# Altium footprint library amirlib.PcbLib: 456 footprints (part 15 of 29)
Each footprint in its own frame and in the unit in brackets; x right, y up, seen from the top. Pads: shape width x height; smd on the part's side, far side on the other; paste and mask are expansions set on the pad; w line width, h text height; cw(c..) or ccw(c..) is an arc to the next point about the centre after c.
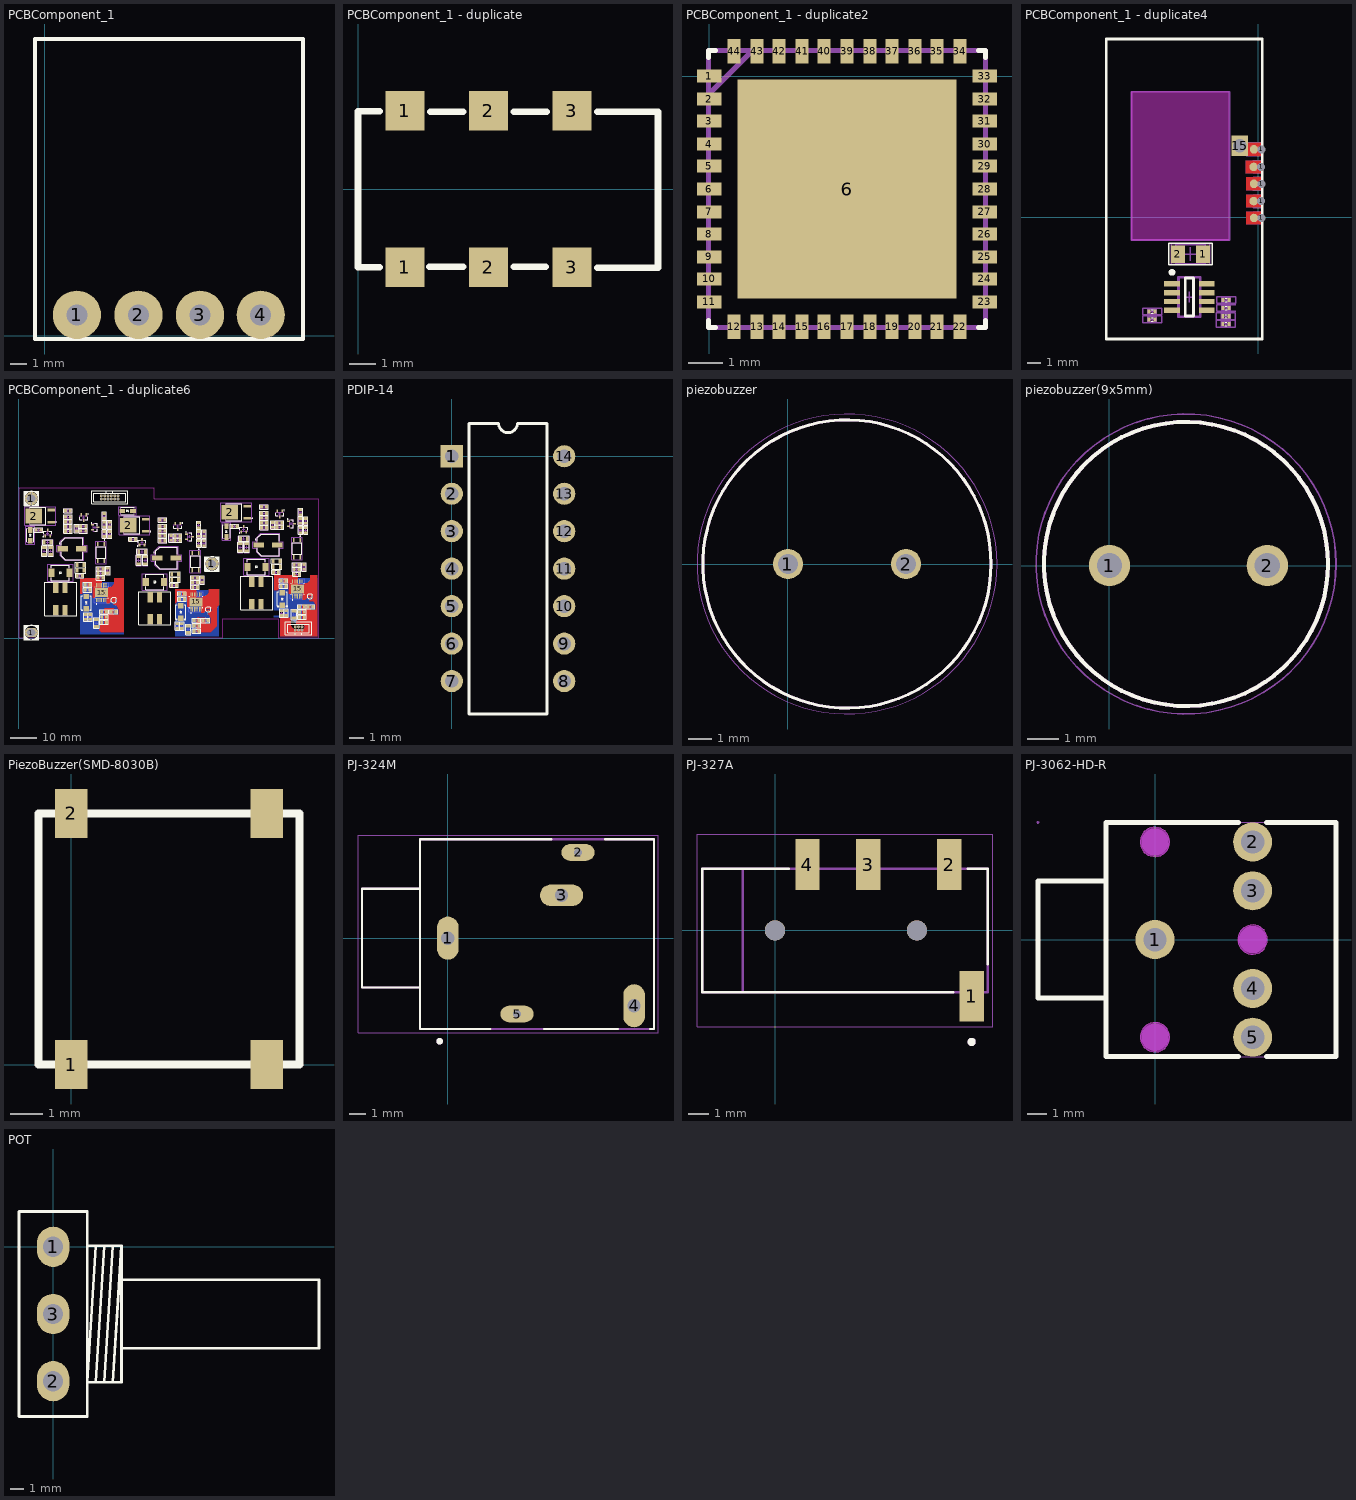
[diagram p14: the footprints below, top view; thin cyan lines are the x and y axes]

## PCBComponent_1 [mm]
pads (4):
  round 3 hole 1.3: 1(2,1.3) 2(5.825,1.3) 3(9.65,1.3) 4(13.425,1.3)
Top Overlay:
  lines w0.254: -0.6,-0.2 -0.6,18.45 16.05,18.45 16.05,-0.2 -0.6,-0.2
3D body "User Library-KEFA 3_81mm_4pin_RA.STEP": height 11.18, standoff -0.1, extent -0.565,0 16.065,18.4

## PCBComponent_1 - duplicate [mm]
pads (6):
  rect 1.5x1.5 smd: 1(1.8,-2.987) 1(1.8,3.013) 2(5,-2.987) 2(5,3.013) 3(8.2,-2.987) 3(8.2,3.013)
Top Overlay:
  lines w0.254: 0.825,-2.987 0,-2.987 0,2.987 0.825,2.987 ; 2.725,-2.975 4.025,-2.975 ; 2.775,2.975 4.025,2.975 ; 5.975,-2.975 7.2,-2.975 ; 5.975,2.975 7.225,2.975 ; 9.175,-3 11.475,-3 ; 9.175,2.975 11.5,2.975 11.5,-3

## PCBComponent_1 - duplicate1 [mm]
Keep-Out Layer:
  drawing of 191 lines, arcs and shapes, not listed

## PCBComponent_1 - duplicate2 [mil]
pads (45):
  rect 28x15 smd: 1(0,0) 2(0,-26) 3(0,-51) 4(0,-77) 5(0,-102) 6(0,-128) 7(0,-154) 8(0,-179) 9(0,-205) 10(0,-230) 11(0,-256) 23(312,-256) 24(312,-230) 25(312,-205) 26(312,-179) 27(312,-154) 28(312,-128) 29(312,-102) 30(312,-77) 31(312,-51) 32(312,-26) 33(312,0)
  rect 248x248 smd: 6(156,-128)
  rect 15x28 smd: 12(28,-284) 13(54,-284) 14(79,-284) 15(105,-284) 16(130,-284) 17(156,-284) 18(182,-284) 19(207,-284) 20(233,-284) 21(258,-284) 22(284,-284) 34(284,28) 35(258,28) 36(233,28) 37(207,28) 38(182,28) 39(156,28) 40(130,28) 41(105,28) 42(79,28) 43(54,28) 44(28,28)
Top Overlay:
  lines w6: -1,-277 -1,-285 7,-285 ; -1,21 -1,29 7,29 ; 305,-285 313,-285 313,-277 ; 305,29 313,29 313,21
Mechanical 13:
  lines w6: -1,-285 -1,29 ; -1,-285 313,-285 ; -1,-285 -1,29 ; -1,-285 313,-285 ; -1,29 313,29 ; -1,29 313,29 ; 313,-285 313,29 ; 313,-285 313,29 ; -1,-263 -1,-248 -1,-263 ; -1,-238 -1,-223 -1,-238 ; -1,-212 -1,-197 -1,-212 ; -1,-187 -1,-172 -1,-187 ; -1,-161 -1,-146 -1,-161 ; -1,-135 -1,-121 -1,-135 ; -1,-110 -1,-95 -1,-110 ; -1,-84 -1,-69 -1,-84 ; -1,-59 -1,-44 -1,-59 ; -1,-33 -1,-18 -1,-33 ; -1,-21 49,29 -1,-21 ; -1,-8 -1,7 -1,-8 ; 21,-285 36,-285 21,-285 ; 21,29 36,29 21,29 ; 46,-285 61,-285 46,-285 ; 46,29 61,29 46,29 ; 72,-285 87,-285 72,-285 ; 72,29 87,29 72,29 ; 97,-285 112,-285 97,-285 ; 97,29 112,29 97,29 ; 123,-285 138,-285 123,-285 ; 123,29 138,29 123,29 ; 149,-285 163,-285 149,-285 ; 149,29 163,29 149,29 ; 174,-285 189,-285 174,-285 ; 174,29 189,29 174,29 ; 200,-285 215,-285 200,-285 ; 200,29 215,29 200,29 ; 225,-285 240,-285 225,-285 ; 225,29 240,29 225,29 ; 251,-285 266,-285 251,-285 ; 251,29 266,29 251,29 ; 276,-285 291,-285 276,-285 ; 276,29 291,29 276,29 ; 313,-263 313,-248 313,-263 ; 313,-238 313,-223 313,-238 ; 313,-212 313,-197 313,-212 ; 313,-187 313,-172 313,-187 ; 313,-161 313,-146 313,-161 ; 313,-135 313,-121 313,-135 ; 313,-110 313,-95 313,-110 ; 313,-84 313,-69 313,-84 ; 313,-59 313,-44 313,-59 ; 313,-33 313,-18 313,-33 ; 313,-8 313,7 313,-8
3D body "ENC424J600-I_ML--3DModel-STEP-510211.STEP": height 39.37, standoff 0, extent -1.48,-285.48 313.48,29.48

## PCBComponent_1 - duplicate3 [mm]

## PCBComponent_1 - duplicate4 [mm]
pads (28):
  rect 0.2x0.3 smd: 1(-8.026,-6.934) 1(-7.58,-7.518) 1(-2.591,-7.29) 1(-2.577,-6.096) 1(-2.145,-7.849) 1(-2.131,-6.68) 2(-8.026,-7.518) 2(-7.58,-6.934) 2(-2.591,-7.849) 2(-2.577,-6.68) 2(-2.145,-7.29) 2(-2.131,-6.096)
  rect 1.15x0.4 smd: 1(-6.335,-4.902) 2(-6.335,-5.552) 3(-6.335,-6.202) 4(-6.335,-6.852) 5(-3.785,-6.852) 6(-3.785,-6.202) 7(-3.785,-5.552) 8(-3.785,-4.902)
  rect 1.05x1.3 smd: 1(-4.049,-2.711) 2(-5.899,-2.711)
  round 0.625 hole 0.6 copper offset -0.55,0 mask-2539.97: 1(0.224,3.708) 1(0.228,1.193) 1(0.254,-0.051) 1(0.254,2.464) 1(0.254,5.004)
  rect 1.2x1.5 / inner rect 1.2x1.5 / far side rect 1x1.5 hole 1: 15(-1.346,5.258)
via -1192.174,-1183.767 diameter 0 hole 0.854
via -1192.174,-1183.767 diameter 0 hole 0.854
via -1192.205,-1185.063 diameter 0 hole 0.854
via -1192.205,-1185.063 diameter 0 hole 0.854
via -1192.174,-1186.307 diameter 0 hole 0.854
via -1192.174,-1186.307 diameter 0 hole 0.854
via -1192.2,-1187.578 diameter 0 hole 0.854
via -1192.2,-1187.578 diameter 0 hole 0.854
via -1192.174,-1188.822 diameter 0 hole 0.854
via -1192.174,-1188.822 diameter 0 hole 0.854
Top Layer:
  region: -0.855,4.534 0.237,4.534 0.263,4.559 0.263,5.474 -0.855,5.474
  region: -0.885,3.238 0.207,3.238 0.232,3.263 0.232,4.178 -0.885,4.178
  region: -0.855,1.994 0.237,1.994 0.263,2.019 0.263,2.934 -0.855,2.934
  region: -0.881,0.723 0.211,0.723 0.237,0.749 0.237,1.663 -0.881,1.663
  region: -0.855,-0.521 0.237,-0.521 0.263,-0.495 0.263,0.419 -0.855,0.419
  lines w0.254: -6.71,-4.902 -6.335,-4.902
Bottom Layer:
  region: -0.855,4.534 0.237,4.534 0.263,4.559 0.263,5.474 -0.855,5.474
  region: -0.885,3.238 0.207,3.238 0.232,3.263 0.232,4.178 -0.885,4.178
  region: -0.855,1.994 0.237,1.994 0.263,2.019 0.263,2.934 -0.855,2.934
  region: -0.881,0.723 0.211,0.723 0.237,0.749 0.237,1.663 -0.881,1.663
  region: -0.855,-0.521 0.237,-0.521 0.263,-0.495 0.263,0.419 -0.855,0.419
Top Overlay:
  circle w0.25: c-6.335,-4.052 r0.125
  lines w0.051: -7.88,-7.645 -7.727,-7.645 ; -7.88,-7.391 -7.727,-7.391 ; -7.88,-7.061 -7.727,-7.061 ; -7.88,-6.807 -7.727,-6.807 ; -2.444,-7.976 -2.292,-7.976 ; -2.444,-7.722 -2.292,-7.722 ; -2.444,-7.417 -2.292,-7.417 ; -2.444,-7.163 -2.292,-7.163 ; -2.43,-6.807 -2.277,-6.807 ; -2.43,-6.553 -2.277,-6.553 ; -2.43,-6.223 -2.277,-6.223 ; -2.43,-5.969 -2.277,-5.969
  lines w0.1: -6.574,-3.498 -6.574,-1.923 -3.373,-1.923 -3.373,-3.498 -6.574,-3.498
  lines w0.2: -11.176,-8.966 0.305,-8.966 0.305,13.132 -11.176,13.132 -11.176,-8.966 ; -5.36,-7.274 -4.76,-7.274 -4.76,-4.48 -5.36,-4.48 -5.36,-7.274
Top Solder:
  region: -0.857,4.509 -0.857,5.499 0.266,5.499 0.266,4.509
  region: -0.888,3.213 -0.888,4.203 0.235,4.203 0.235,3.213
  region: -0.857,1.969 -0.857,2.959 0.266,2.959 0.266,1.969
  region: -0.883,0.698 -0.883,1.688 0.24,1.688 0.24,0.698
  region: -0.857,-0.546 -0.857,0.444 0.266,0.444 0.266,-0.546
Bottom Solder:
  region: -0.855,4.534 0.237,4.534 0.263,4.559 0.263,5.474 -0.855,5.474
  region: -0.885,3.238 0.207,3.238 0.232,3.263 0.232,4.178 -0.885,4.178
  region: -0.855,1.994 0.237,1.994 0.263,2.019 0.263,2.934 -0.855,2.934
  region: -0.881,0.723 0.211,0.723 0.237,0.749 0.237,1.663 -0.881,1.663
  region: -0.855,-0.521 0.237,-0.521 0.263,-0.495 0.263,0.419 -0.855,0.419
Keep-Out Layer:
  board cut-out: -9.347,-1.676 -2.159,-1.676 -2.159,9.246 -9.347,9.246
Mechanical 6:
  lines w0.127: -0.356,0.356 0.254,0.356 ; -0.356,1.626 0.254,1.626 ; -0.356,1.981 0.254,1.981 ; -0.356,2.946 0.254,2.946 ; -0.356,4.166 0.229,4.166 ; -0.33,0.711 0.254,0.711 ; -0.33,3.277 0.229,3.277 ; 0.229,4.547 -0.33,4.547 -0.864,4.547 -0.864,5.486 -0.33,5.486 0.254,5.486 0.254,4.572 ; -2.108,-1.676 -9.322,-1.676 -9.322,9.246 -2.108,9.246 ; -2.108,-1.676 -2.108,9.246 ; -2.108,-1.676 -2.108,9.246
Mechanical 13:
  lines w0.1: -8.128,-7.693 -7.478,-7.693 -7.478,-7.343 -8.128,-7.343 -8.128,-7.693 ; -8.128,-7.109 -7.478,-7.109 -7.478,-6.759 -8.128,-6.759 -8.128,-7.109 ; -6.049,-3.411 -6.049,-2.011 -3.899,-2.011 -3.899,-3.411 -6.049,-3.411 ; -2.693,-8.024 -2.043,-8.024 -2.043,-7.674 -2.693,-7.674 -2.693,-8.024 ; -2.693,-7.465 -2.043,-7.465 -2.043,-7.115 -2.693,-7.115 -2.693,-7.465 ; -2.679,-6.855 -2.029,-6.855 -2.029,-6.505 -2.679,-6.505 -2.679,-6.855 ; -2.679,-6.271 -2.029,-6.271 -2.029,-5.921 -2.679,-5.921 -2.679,-6.271
  lines w0.2: -5.86,-7.327 -4.26,-7.327 -4.26,-4.427 -5.86,-4.427 -5.86,-7.327
Mechanical 15:
  lines w0.1: -7.978,-7.518 -7.628,-7.518 ; -7.978,-6.934 -7.628,-6.934 ; -7.803,-7.693 -7.803,-7.343 ; -7.803,-7.109 -7.803,-6.759 ; -5.474,-2.711 -4.474,-2.711 ; -5.441,-5.877 -4.679,-5.877 ; -5.06,-6.258 -5.06,-5.496 ; -4.974,-3.211 -4.974,-2.211 ; -2.543,-7.849 -2.193,-7.849 ; -2.543,-7.29 -2.193,-7.29 ; -2.529,-6.68 -2.179,-6.68 ; -2.529,-6.096 -2.179,-6.096 ; -2.368,-8.024 -2.368,-7.674 ; -2.368,-7.465 -2.368,-7.115 ; -2.354,-6.855 -2.354,-6.505 ; -2.354,-6.271 -2.354,-5.921 ; -1.654,-6.93 -3.054,-6.93 -3.054,-6.43 -1.654,-6.43 ; -8.503,-7.768 -8.503,-7.268 -7.103,-7.268 -7.103,-7.768 -8.503,-7.768 ; -8.503,-7.184 -8.503,-6.684 -7.103,-6.684 -7.103,-7.184 -8.503,-7.184 ; -6.399,-3.461 -6.399,-1.961 -3.549,-1.961 -3.549,-3.461 -6.399,-3.461 ; -3.068,-8.099 -3.068,-7.599 -1.668,-7.599 -1.668,-8.099 -3.068,-8.099 ; -3.068,-7.54 -3.068,-7.04 -1.668,-7.04 -1.668,-7.54 -3.068,-7.54 ; -3.054,-6.346 -3.054,-5.846 -1.654,-5.846 -1.654,-6.346 -3.054,-6.346
3D body "0201.STEP": height 0.25, standoff 0, extent -2.608,-6.807 -2.1,-6.553
3D body "0201.STEP": height 0.25, standoff 0, extent -2.608,-6.223 -2.1,-5.969
3D body "0201.STEP": height 0.25, standoff 0, extent -2.622,-7.976 -2.114,-7.722
3D body "0201.STEP": height 0.25, standoff 0, extent -2.622,-7.417 -2.114,-7.163
3D body "0201.STEP": height 0.25, standoff 0, extent -8.057,-7.061 -7.549,-6.807
3D body "0201.STEP": height 0.25, standoff 0, extent -8.057,-7.645 -7.549,-7.391
3D body "cap 0805.STEP": height 0.65, standoff 0, extent -6.015,-3.321 -3.983,-2.051
3D body "User Library-SOT-23-8 Thin.STEP": height 1.1, standoff 0, extent -6.544,-7.317 -3.586,-4.417

## PCBComponent_1 - duplicate5 [mm]

## PCBComponent_1 - duplicate6 [mm]
pads (394):
  rect 1.57x2.22 smd: 1(4.318,41.24) 1(79.026,42.68) 2(4.318,37.16) 2(79.026,38.6)
  oval 5x3.5 hole 3.15 mask+0.1: 1(4.736,2.152)
  round 5 hole 3.15 mask+0.1: 1(4.736,53.231) 1(73.557,28.325)
  rect 1.05x1.3 smd: 1(6.568,41.224) 1(17.744,44.357) 1(17.744,48.59) 1(19.594,40.716) 1(19.594,42.537) 1(19.594,46.177) 1(22.245,23.766) 1(25.237,20.432) 1(25.436,40.843) 1(25.436,42.621) 1(27.087,18.4) 1(30.226,22.972) 1(31.536,6.056) 1(31.536,8.088) 1(31.536,10.12) 1(32.04,24.75) 1(32.04,26.528) 1(36.942,10.12) 1(42.541,37.711) 1(53.717,40.844) 1(53.717,45.077) 1(55.567,37.203) 1(55.567,39.023) 1(55.567,42.664) 1(58.218,20.253) 1(61.21,16.919) 1(61.409,37.33) 1(61.409,39.108) 1(63.06,14.887) 1(66.199,19.459) 1(66.671,2.695) 1(66.671,4.727) 1(66.671,6.759) 1(68.013,21.237) 1(68.013,23.015) 1(72.077,6.759) 1(81.276,42.664) 1(92.452,45.797) 1(92.452,50.03) 1(94.302,42.156) 1(94.302,43.976) 1(94.302,47.617) 1(96.953,25.206) 1(99.945,21.872) 1(100.144,42.283) 1(100.144,44.061) 1(101.795,19.84) 1(104.934,24.412) 1(106.748,26.19) 1(106.748,27.968) 1(106.854,7.978) 1(106.854,10.01) 1(106.854,12.042) 1(111.999,12.04) 2(8.418,41.224) 2(17.744,40.716) 2(17.744,42.537) 2(17.744,46.177) 2(19.594,44.357) 2(19.594,48.59) 2(23.586,40.843) 2(23.586,42.621) 2(24.095,23.766) 2(25.237,18.4) 2(27.087,20.432) 2(30.19,24.75) 2(30.19,26.528) 2(32.076,22.972) 2(33.386,6.056) 2(33.386,8.088) 2(33.386,10.12) 2(35.092,10.12) 2(44.391,37.711) 2(53.717,37.203) 2(53.717,39.023) 2(53.717,42.664) 2(55.567,40.844) 2(55.567,45.077) 2(59.559,37.33) 2(59.559,39.108) 2(60.068,20.253) 2(61.21,14.887) 2(63.06,16.919) 2(66.163,21.237) 2(66.163,23.015) 2(68.049,19.459) 2(68.521,2.695) 2(68.521,4.727) 2(68.521,6.759) 2(70.227,6.759) 2(83.126,42.664) 2(92.452,42.156) 2(92.452,43.976) 2(92.452,47.617) 2(94.302,45.797) 2(94.302,50.03) 2(98.294,42.283) 2(98.294,44.061) 2(98.803,25.206) 2(99.945,19.84) 2(101.795,21.872) 2(104.898,26.19) 2(104.898,27.968) 2(106.784,24.412) 2(108.704,7.978) 2(108.704,10.01) 2(108.704,12.042) 2(110.149,12.04)
  rect 1.05x1.7 smd: 1(9.67,36.533) 1(22.204,27.932) 1(22.232,25.819) 1(45.643,33.02) 1(58.178,24.419) 1(58.206,22.306) 1(84.378,37.973) 1(96.913,29.372) 1(96.941,27.259) 2(12.266,36.533) 2(24.8,27.932) 2(24.828,25.819) 2(48.239,33.02) 2(60.774,24.419) 2(60.802,22.306) 2(86.974,37.973) 2(99.509,29.372) 2(99.537,27.259)
  rect 1.7x1.05 smd: 1(9.698,34.529) 1(12.111,31.933) 1(45.671,31.016) 1(48.084,28.42) 1(84.406,35.969) 1(86.819,33.373) 2(9.698,31.933) 2(12.111,34.529) 2(45.671,28.42) 2(48.084,31.016) 2(84.406,33.373) 2(86.819,35.969)
  rect 0.6x1.15 smd: 1(9.972,38.956) 1(25.588,47.048) 1(45.945,35.443) 1(61.504,43.67) 1(84.68,40.396) 1(100.296,48.488) 2(11.872,38.956) 2(23.688,47.048) 2(47.845,35.443) 2(59.604,43.67) 2(86.58,40.396) 2(98.396,48.488) 3(10.922,41.206) 3(24.638,44.798) 3(46.895,37.693) 3(60.554,41.42) 3(85.63,42.646) 3(99.346,46.238)
  rect 2.81x0.98 smd: 1(12.293,44.264) 1(48.266,40.751) 1(87.001,45.704) 3(12.293,48.844) 3(48.266,45.331) 3(87.001,50.284)
  rect 2.29x3.12 smd: 1(12.344,24.943) 1(48.318,21.43) 1(87.046,27.178) 2(19.204,24.943) 2(55.178,21.43) 2(93.906,27.178)
  rect 2x4 smd: 1(14.044,10.693) 1(50.017,7.18) 1(88.725,13.022) 2(17.544,10.693) 2(53.517,7.18) 2(92.225,13.022) 3(17.544,19.193) 3(53.517,15.68) 3(92.225,21.522) 4(14.044,19.193) 4(50.017,15.68) 4(88.725,21.522)
  rect 4x2 smd: 1(16.683,34.12) 1(52.656,30.607) 1(91.391,35.56) 2(23.783,34.12) 2(59.756,30.607) 2(98.491,35.56)
  rect 1.3x1.05 smd: 1(21.971,40.807) 1(25.4,7.188) 1(27.178,7.188) 1(32.533,42.331) 1(32.558,40.633) 1(32.558,45.633) 1(33.909,26.655) 1(34.544,42.331) 1(34.544,40.633) 1(57.944,37.294) 1(60.306,3.675) 1(62.084,3.675) 1(68.506,38.818) 1(68.531,37.12) 1(68.531,42.12) 1(69.882,23.142) 1(70.517,38.818) 1(70.517,37.12) 1(96.679,42.247) 1(100.108,8.628) 1(101.886,8.628) 1(107.241,43.771) 1(107.266,42.073) 1(107.266,47.073) 1(108.617,28.095) 1(109.252,43.771) 1(109.252,42.073) 2(21.971,42.657) 2(25.4,9.038) 2(27.178,9.038) 2(32.533,44.181) 2(32.558,38.783) 2(32.558,47.483) 2(33.909,24.805) 2(34.544,44.181) 2(34.544,38.783) 2(57.944,39.144) 2(60.306,5.525) 2(62.084,5.525) 2(68.506,40.668) 2(68.531,35.27) 2(68.531,43.97) 2(69.882,21.292) 2(70.517,40.668) 2(70.517,35.27) 2(96.679,44.097) 2(100.108,10.478) 2(101.886,10.478) 2(107.241,45.621) 2(107.266,40.223) 2(107.266,48.923) 2(108.617,26.245) 2(109.252,45.621) 2(109.252,40.223)
  rect 2.192x2.047 smd paste+0 mask+0.051: 1(25.654,15.883) 1(61.627,12.37) 1(100.362,17.323) 2(25.654,11.161) 2(61.627,7.648) 2(100.362,12.601)
  rect 1.15x0.6 smd: 1(27.958,43.19) 1(63.931,39.677) 1(102.666,44.63) 2(27.958,41.29) 2(63.931,37.777) 2(102.666,42.73) 3(30.208,42.24) 3(66.181,38.727) 3(104.916,43.68)
  rect 1.82x1.16 smd: 1(29.515,4.496) 1(64.516,2.083) 1(104.8,7.742) 2(29.515,7.092) 2(64.516,4.679) 2(104.8,10.338)
  rect 0.3x1.6 smd paste-0.025: 1(29.546,14.572) 1(65.519,11.059) 1(104.254,16.012) 2(30.196,14.572) 2(66.169,11.059) 2(104.904,16.012) 3(30.846,14.572) 3(66.819,11.059) 3(105.554,16.012) 4(31.496,14.572) 4(67.469,11.059) 4(106.204,16.012) 5(32.146,14.572) 5(68.119,11.059) 5(106.854,16.012) 6(32.796,14.572) 6(68.769,11.059) 6(107.504,16.012) 7(33.446,14.572) 7(69.419,11.059) 7(108.154,16.012) 8(33.446,20.172) 8(69.419,16.659) 8(108.154,21.612) 9(32.796,20.172) 9(68.769,16.659) 9(107.504,21.612) 10(32.146,20.172) 10(68.119,16.659) 10(106.854,21.612) 11(31.496,20.172) 11(67.469,16.659) 11(106.204,21.612) 12(30.846,20.172) 12(66.819,16.659) 12(105.554,21.612) 13(30.196,20.172) 13(66.169,16.659) 13(104.904,21.612) 14(29.546,20.172) 14(65.519,16.659) 14(104.254,21.612)
  round 1.1 hole 0.7: 1(31.394,54.305) 1(107.798,3.099) 2(31.394,53.035) 2(107.798,4.369) 3(32.664,54.305) 3(106.528,3.099) 4(32.664,53.035) 4(106.528,4.369) 5(33.934,54.305) 5(105.258,3.099) 6(33.934,53.035) 6(105.258,4.369) 7(35.204,54.305) 8(35.204,53.035) 9(36.474,54.305) 10(36.474,53.035) 11(37.744,54.305) 12(37.744,53.035)
  rrect25% 0.57x1.61 smd: 1(32.512,35.949) 1(68.485,32.436) 1(107.22,37.389) 2(32.512,29.449) 2(68.485,25.936) 2(107.22,30.889) 3(29.972,35.949) 3(65.945,32.436) 3(104.68,37.389) 4(29.972,29.449) 4(65.945,25.936) 4(104.68,30.889)
  round 0.025 smd: 1(36.182,15.022) 1(72.155,11.509) 1(110.89,16.462) 2(36.195,14.082) 2(72.168,10.569) 2(110.903,15.522)
  rect 2.22x1.57 smd: 1(43.419,48.529) 2(39.338,48.529)
  rect 6.33x5.67 smd: 2(5.673,46.554) 2(41.646,43.041) 2(80.381,47.994)
  round 0.43 hole 0.33 mask+0: 15(29.996,16.622) 15(29.996,18.122) 15(31.496,16.622) 15(31.496,18.122) 15(32.996,16.622) 15(32.996,18.122) 15(65.969,13.109) 15(65.969,14.609) 15(67.469,13.109) 15(67.469,14.609) 15(68.969,13.109) 15(68.969,14.609) 15(104.704,18.062) 15(104.704,19.562) 15(106.204,18.062) 15(106.204,19.562) 15(107.704,18.062) 15(107.704,19.562)
  rect 5x3.4 smd paste-3 mask+0: 15(31.496,17.372) 15(67.469,13.859) 15(106.204,18.812)
  round 0.6 hole 0.4: S(2.736,2.152) S(2.736,53.231) S(3.322,0.738) S(3.322,3.566) S(3.322,51.817) S(3.322,54.645) S(4.736,51.231) S(4.736,55.231) S(6.15,0.738) S(6.15,3.566) S(6.15,51.817) S(6.15,54.645) S(6.736,2.152) S(6.736,53.231) S(71.557,28.325) S(72.143,26.911) S(72.143,29.74) S(73.557,26.325) S(73.557,30.325) S(74.971,26.911) S(74.971,29.74) S(75.557,28.325)
Top Layer:
  region: 40.005,2.304 31.354,2.304 30.523,3.134 30.523,3.416 30.925,3.416 30.925,4.906 32.561,4.906 32.561,6.938 32.561,8.97 32.561,11.27 32.563,11.308 32.686,11.41 32.69,11.409 36.287,11.409 36.287,11.27 35.917,11.27 35.917,8.97 37.967,8.97 37.967,11.27 37.598,11.27 37.598,11.724 37.575,11.894 37.51,12.052 37.406,12.188 37.065,12.529 36.929,12.633 36.771,12.698 36.601,12.721 35.927,12.721 35.878,12.838 36.244,13.204 36.576,13.204 36.771,13.243 36.936,13.353 37.317,13.734 37.428,13.9 37.467,14.095 37.467,14.45 37.428,14.646 37.317,14.811 37.152,14.921 36.957,14.96 35.433,14.96 35.238,14.921 35.073,14.811 34.962,14.646 34.923,14.45 34.923,14.069 34.962,13.874 35.001,13.816 34.465,13.279 33.452,13.279 33.452,14.572 33.446,14.615 33.446,15.872 31.89,15.872 31.869,15.886 31.674,15.925 30.709,15.925 30.514,15.886 30.493,15.872 30.376,15.872 30.353,15.877 29.388,15.877 29.365,15.872 28.896,15.872 28.896,15.457 28.891,15.434 28.096,15.434 28.096,17.25 28.112,17.25 28.112,19.55 26.262,19.55 26.262,21.582 24.212,21.582 24.212,19.282 24.212,17.406 24.058,17.406 24.058,16.891 23.368,16.891 23.368,22.616 25.12,22.616 25.12,22.784 31.051,22.784 31.051,21.822 31.49,21.822 31.49,20.172 31.496,20.13 31.496,18.872 32.669,18.872 32.796,18.872 34.096,18.872 34.096,19.517 34.828,19.517 34.998,19.539 35.156,19.604 35.292,19.709 36.1,20.517 36.204,20.653 36.269,20.811 36.292,20.98 36.292,22.784 40.005,22.784
  region: 76.251,12.544 76.225,12.524 75.639,11.938 75.479,11.73 75.378,11.486 75.344,11.225 75.344,4.507 73.141,2.304 67.696,2.304 67.696,3.577 67.696,5.609 67.696,6.718 67.705,6.784 67.705,7.528 67.802,7.625 67.883,7.731 67.975,7.793 68.086,7.958 68.096,8.012 68.125,8.033 68.236,8.06 68.335,7.984 68.493,7.919 68.663,7.896 71.052,7.896 71.052,5.609 73.102,5.609 73.102,7.909 72.733,7.909 72.733,8.376 72.71,8.546 72.645,8.704 72.541,8.84 72.365,9.015 72.229,9.12 72.071,9.185 71.912,9.206 71.883,9.248 71.851,9.325 72.217,9.691 72.549,9.691 72.744,9.73 72.91,9.84 73.291,10.221 73.401,10.387 73.44,10.582 73.44,10.937 73.401,11.132 73.291,11.298 73.125,11.408 72.93,11.447 71.406,11.447 71.211,11.408 71.046,11.298 70.935,11.132 70.896,10.937 70.896,10.556 70.935,10.361 70.974,10.302 70.438,9.766 69.425,9.766 69.425,11.059 69.419,11.102 69.419,12.359 67.665,12.359 67.615,12.369 66.65,12.369 66.599,12.359 66.349,12.359 66.326,12.364 65.361,12.364 65.338,12.359 64.869,12.359 64.869,11.944 64.865,11.921 64.069,11.921 64.069,13.737 64.085,13.737 64.085,16.037 62.235,16.037 62.235,18.069 60.185,18.069 60.185,15.769 60.185,13.893 60.031,13.893 60.031,13.378 59.614,13.378 59.614,18.618 67.024,18.618 67.024,18.309 67.464,18.309 67.464,16.659 67.469,16.616 67.469,15.359 68.642,15.359 68.769,15.359 70.069,15.359 70.069,16.003 70.801,16.003 70.971,16.026 71.129,16.091 71.265,16.195 72.073,17.004 72.177,17.139 72.243,17.298 72.265,17.467 72.265,18.618 76.251,18.618
  region: 113.739,0.764 99.621,0.764 99.621,7.341 99.594,7.476 99.692,7.603 103.036,7.603 103.036,7.677 103.047,7.679 103.263,7.769 103.39,7.714 103.39,6.662 103.614,6.662 103.614,5.005 103.648,4.744 103.749,4.5 103.909,4.291 104.336,3.864 104.417,3.724 104.613,3.529 104.852,3.39 105.119,3.319 105.396,3.319 105.55,3.36 106.235,3.36 106.389,3.319 106.666,3.319 106.82,3.36 107.505,3.36 107.659,3.319 107.936,3.319 108.203,3.39 108.442,3.529 108.638,3.724 108.776,3.964 108.848,4.231 108.848,4.507 108.776,4.774 108.638,5.014 108.442,5.209 108.203,5.347 107.936,5.419 107.659,5.419 107.505,5.377 106.82,5.377 106.666,5.419 106.389,5.419 106.235,5.377 105.676,5.377 105.631,5.422 105.631,6.662 106.21,6.662 106.21,6.828 107.879,6.828 107.879,8.86 107.879,10.892 107.879,12.849 110.974,12.849 110.974,10.89 113.024,10.89 113.024,13.19 112.644,13.19 112.644,13.329 112.622,13.499 112.556,13.657 112.452,13.793 112.276,13.968 112.141,14.073 111.983,14.138 111.813,14.16 110.635,14.16 110.586,14.278 110.952,14.644 111.284,14.644 111.479,14.683 111.645,14.793 112.026,15.174 112.136,15.34 112.175,15.535 112.175,15.89 112.136,16.085 112.026,16.251 111.86,16.361 111.665,16.4 110.141,16.4 109.946,16.361 109.781,16.251 109.67,16.085 109.631,15.89 109.631,15.509 109.67,15.314 109.709,15.255 109.173,14.719 108.16,14.719 108.16,16.012 108.154,16.055 108.154,17.312 106.38,17.312 106.357,17.317 105.391,17.317 105.368,17.312 105.084,17.312 105.061,17.317 104.096,17.317 104.073,17.312 103.604,17.312 103.604,16.897 103.6,16.874 102.804,16.874 102.804,18.69 102.82,18.69 102.82,20.99 100.97,20.99 100.97,23.022 98.92,23.022 98.92,20.722 98.92,18.846 98.766,18.846 98.766,18.331 97.206,18.331 97.206,23.952 105.759,23.952 105.759,23.262 106.199,23.262 106.199,21.612 106.204,21.569 106.204,20.312 107.377,20.312 107.504,20.312 108.804,20.312 108.804,20.956 109.536,20.956 109.706,20.979 109.864,21.044 110,21.148 110.808,21.957 110.912,22.092 110.978,22.251 111,22.42 111,23.952 113.739,23.952
  region: 71.762,10.201 71.406,10.556 71.406,10.937 72.93,10.937 72.93,10.582 72.549,10.201
  region: 72.562,11.877 72.917,11.522 72.917,11.141 71.393,11.141 71.393,11.496 71.774,11.877
  region: 110.497,15.154 110.141,15.509 110.141,15.89 111.665,15.89 111.665,15.535 111.284,15.154
  region: 111.297,16.83 111.652,16.475 111.652,16.094 110.128,16.094 110.128,16.449 110.509,16.83
  region: 36.589,15.39 36.944,15.035 36.944,14.654 35.42,14.654 35.42,15.009 35.801,15.39
  region: 35.789,13.714 35.433,14.069 35.433,14.45 36.957,14.45 36.957,14.095 36.576,13.714
Bottom Layer:
  region: 39.954,1.6 23.317,1.6 23.317,21.26 39.954,21.26
  region: 76.2,0.764 59.563,0.764 59.563,18.263 76.2,18.263
  region: 113.739,0.764 99.621,0.764 99.621,7.341 99.576,7.565 99.449,7.755 99.259,7.882 99.035,7.927 97.155,7.927 97.155,8.593 99.607,8.593 104.337,3.863 104.417,3.724 104.613,3.529 104.852,3.39 105.119,3.319 105.396,3.319 105.663,3.39 105.893,3.523 106.122,3.39 106.389,3.319 106.666,3.319 106.933,3.39 107.163,3.523 107.392,3.39 107.659,3.319 107.936,3.319 108.203,3.39 108.442,3.529 108.638,3.724 108.776,3.964 108.848,4.231 108.848,4.507 108.776,4.774 108.638,5.014 108.442,5.209 108.203,5.347 107.936,5.419 107.659,5.419 107.392,5.347 107.163,5.215 106.933,5.347 106.666,5.419 106.389,5.419 106.122,5.347 105.893,5.215 105.764,5.289 100.738,10.314 100.53,10.475 100.286,10.575 100.025,10.61 97.155,10.61 97.155,22.911 113.739,22.911
Top Overlay:
  drawing of 707 lines, arcs and shapes, not listed
Bottom Overlay:
  circle w0.2: c73.582,28.314 r2.7
  circle w0.2: c4.761,2.14 r2.7
  circle w0.2: c4.761,53.219 r2.7
  region: 70.736,30.973 72.541,30.975 70.736,29.169
  region: 76.25,30.973 74.605,30.975 76.25,29.329
  region: 76.257,25.437 74.396,25.435 76.257,27.296
  region: 70.74,25.446 72.731,25.444 70.74,27.435
  region: 1.915,4.799 3.72,4.801 1.915,2.996
  region: 7.429,4.8 5.784,4.801 7.429,3.156
  region: 7.436,-0.737 5.575,-0.739 7.436,1.123
  region: 1.919,-0.727 3.91,-0.729 1.919,1.262
  region: 1.919,50.352 3.91,50.35 1.919,52.341
  region: 7.436,50.343 5.575,50.341 7.436,52.202
  region: 7.429,55.879 5.784,55.881 7.429,54.235
  region: 1.915,55.879 3.72,55.88 1.915,54.075
  lines w0.45: 1.955,-0.65 7.547,-0.65 7.547,4.908 1.955,4.908 1.955,-0.65 ; 1.955,50.429 1.955,55.987 7.547,55.987 7.547,50.429 1.955,50.429 ; 70.776,25.523 76.368,25.523 76.368,31.081 70.776,31.081 70.776,25.523
Top Paste:
  region: 38.771,45.586 40.301,45.586 40.301,44.276 38.771,44.276
  region: 40.881,45.586 42.411,45.586 42.411,44.276 40.881,44.276
  region: 42.991,45.586 44.521,45.586 44.521,44.276 42.991,44.276
  region: 38.771,41.806 40.301,41.806 40.301,40.496 38.771,40.496
  region: 40.881,41.806 42.411,41.806 42.411,40.496 40.881,40.496
  region: 42.991,41.806 44.521,41.806 44.521,40.496 42.991,40.496
  region: 38.771,43.696 40.301,43.696 40.301,42.386 38.771,42.386
  region: 42.991,43.696 44.521,43.696 44.521,42.386 42.991,42.386
  region: 40.881,43.696 42.411,43.696 42.411,42.386 40.881,42.386
  region: 77.506,50.539 79.036,50.539 79.036,49.229 77.506,49.229
  region: 79.616,50.539 81.146,50.539 81.146,49.229 79.616,49.229
  region: 81.726,50.539 83.256,50.539 83.256,49.229 81.726,49.229
  region: 77.506,46.759 79.036,46.759 79.036,45.449 77.506,45.449
  region: 79.616,46.759 81.146,46.759 81.146,45.449 79.616,45.449
  region: 81.726,46.759 83.256,46.759 83.256,45.449 81.726,45.449
  region: 77.506,48.649 79.036,48.649 79.036,47.339 77.506,47.339
  region: 81.726,48.649 83.256,48.649 83.256,47.339 81.726,47.339
  region: 79.616,48.649 81.146,48.649 81.146,47.339 79.616,47.339
  region: 4.908,47.209 6.438,47.209 6.438,45.899 4.908,45.899
  region: 7.018,47.209 8.548,47.209 8.548,45.899 7.018,45.899
  region: 2.798,47.209 4.328,47.209 4.328,45.899 2.798,45.899
  region: 7.018,45.319 8.548,45.319 8.548,44.009 7.018,44.009
  region: 4.908,45.319 6.438,45.319 6.438,44.009 4.908,44.009
  region: 2.798,45.319 4.328,45.319 4.328,44.009 2.798,44.009
  region: 7.018,49.099 8.548,49.099 8.548,47.789 7.018,47.789
  region: 4.908,49.099 6.438,49.099 6.438,47.789 4.908,47.789
  region: 2.798,49.099 4.328,49.099 4.328,47.789 2.798,47.789
  region: 68.624,15.089 68.624,12.629 66.314,12.629 66.314,15.089
  region: 107.359,20.042 107.359,17.582 105.049,17.582 105.049,20.042
  region: 32.651,18.602 32.651,16.142 30.341,16.142 30.341,18.602
Top Solder:
  region: 68.624,15.089 68.624,12.629 66.314,12.629 66.314,15.089
  region: 107.359,20.042 107.359,17.582 105.049,17.582 105.049,20.042
  region: 32.651,18.602 32.651,16.142 30.341,16.142 30.341,18.602
Keep-Out Layer:
  lines w0.15: 0.025,0.178 77.724,0.178 77.724,7.341 99.035,7.341 99.035,0.178 114.325,0.178 114.325,53.162 51.587,53.162 51.587,57.302 0.025,57.302 0.025,0.178
Mechanical 13:
  drawing of 498 lines, arcs and shapes, not listed
Mechanical 15:
  drawing of 678 lines, arcs and shapes, not listed
3D body "cap 0805.STEP": height 0.65, standoff 0, extent 59.696,3.609 60.966,5.641
3D body "cap 0805.STEP": height 0.65, standoff 0, extent 61.094,14.277 63.126,15.547
3D body "step_temp.STEP": height 10.2, standoff 0, extent 51.381,26.457 61.081,34.757
3D body "cap 0805.STEP": height 0.65, standoff 0, extent 58.152,19.593 60.184,20.863
3D body "cap 1206.STEP": height 0.75, standoff 0, extent 57.954,23.644 61.002,25.168
3D body "cap 1206.STEP": height 0.75, standoff 0, extent 57.982,21.531 61.03,23.055
3D body "cap 0805.STEP": height 0.65, standoff 0, extent 66.605,6.099 68.637,7.369
3D body "cap 0805.STEP": height 0.65, standoff 0, extent 66.605,4.067 68.637,5.337
3D body "cap 0805.STEP": height 0.65, standoff 0, extent 66.605,2.035 68.637,3.305
3D body "cap 0805.STEP": height 0.65, standoff 0, extent 67.871,35.154 69.141,37.186
3D body "cap 0805.STEP": height 0.65, standoff 0, extent 59.443,36.72 61.475,37.99
3D body "cap 0805.STEP": height 0.65, standoff 0, extent 67.921,42.054 69.191,44.086
3D body "cap 0805.STEP": height 0.65, standoff 0, extent 70.111,6.149 72.143,7.419
3D body "cap 0805.STEP": height 0.65, standoff 0, extent 59.443,38.498 61.475,39.768
3D body "cap 0805.STEP": height 0.65, standoff 0, extent 66.047,22.405 68.079,23.675
3D body "cap 0805.STEP": height 0.65, standoff 0, extent 66.047,20.627 68.079,21.897
3D body "cap 0805.STEP": height 0.65, standoff 0, extent 99.498,8.562 100.768,10.594
3D body "cap 0805.STEP": height 0.65, standoff 0, extent 99.829,19.23 101.861,20.5
3D body "step_temp.STEP": height 10.2, standoff 0, extent 90.116,31.41 99.816,39.71
3D body "cap 0805.STEP": height 0.65, standoff 0, extent 96.887,24.546 98.919,25.816
3D body "cap 1206.STEP": height 0.75, standoff 0, extent 96.689,28.597 99.737,30.121
3D body "cap 1206.STEP": height 0.75, standoff 0, extent 96.717,26.484 99.765,28.008
3D body "cap 0805.STEP": height 0.65, standoff 0, extent 106.788,11.382 108.82,12.652
3D body "cap 0805.STEP": height 0.65, standoff 0, extent 106.788,9.35 108.82,10.62
3D body "cap 0805.STEP": height 0.65, standoff 0, extent 106.788,7.318 108.82,8.588
3D body "cap 0805.STEP": height 0.65, standoff 0, extent 106.606,40.107 107.876,42.139
3D body "cap 0805.STEP": height 0.65, standoff 0, extent 98.178,41.673 100.21,42.943
3D body "cap 0805.STEP": height 0.65, standoff 0, extent 106.656,47.007 107.926,49.039
3D body "cap 0805.STEP": height 0.65, standoff 0, extent 110.033,11.43 112.065,12.7
3D body "cap 0805.STEP": height 0.65, standoff 0, extent 98.178,43.451 100.21,44.721
3D body "cap 0805.STEP": height 0.65, standoff 0, extent 104.782,27.358 106.814,28.628
3D body "cap 0805.STEP": height 0.65, standoff 0, extent 104.782,25.58 106.814,26.85
3D body "cap 0805.STEP": height 0.65, standoff 0, extent 24.79,7.122 26.06,9.154
3D body "cap 0805.STEP": height 0.65, standoff 0, extent 25.121,17.79 27.153,19.06
3D body "step_temp.STEP": height 10.2, standoff 0, extent 15.408,29.97 25.108,38.27
3D body "cap 0805.STEP": height 0.65, standoff 0, extent 22.179,23.106 24.211,24.376
3D body "cap 1206.STEP": height 0.75, standoff 0, extent 21.98,27.157 25.028,28.681
3D body "cap 1206.STEP": height 0.75, standoff 0, extent 22.008,25.044 25.056,26.568
3D body "cap 0805.STEP": height 0.65, standoff 0, extent 31.47,9.46 33.502,10.73
3D body "cap 0805.STEP": height 0.65, standoff 0, extent 31.47,7.428 33.502,8.698
3D body "cap 0805.STEP": height 0.65, standoff 0, extent 31.47,5.396 33.502,6.666
3D body "cap 0805.STEP": height 0.65, standoff 0, extent 31.898,38.667 33.168,40.699
3D body "cap 0805.STEP": height 0.65, standoff 0, extent 23.47,40.233 25.502,41.503
3D body "cap 0805.STEP": height 0.65, standoff 0, extent 31.948,45.567 33.218,47.599
3D body "cap 0805.STEP": height 0.65, standoff 0, extent 34.976,9.51 37.008,10.78
3D body "cap 0805.STEP": height 0.65, standoff 0, extent 23.47,42.011 25.502,43.281
3D body "cap 0805.STEP": height 0.65, standoff 0, extent 30.074,25.918 32.106,27.188
3D body "cap 0805.STEP": height 0.65, standoff 0, extent 30.074,24.14 32.106,25.41
3D body "SK86C.STEP": height 2.62, standoff 0, extent 47.651,18.477 55.591,24.382
3D body "User Library-DIOM5539X24.STEP": height 2.45, standoff 0.03, extent 59.703,7.257 63.603,12.757
3D body "SK86C.STEP": height 2.62, standoff 0, extent 86.379,24.225 94.319,30.131
3D body "User Library-DIOM5539X24.STEP": height 2.45, standoff 0.03, extent 98.438,12.21 102.338,17.71
3D body "SK86C.STEP": height 2.62, standoff 0, extent 11.677,21.99 19.617,27.895
3D body "User Library-DIOM5539X24.STEP": height 2.45, standoff 0.03, extent 23.729,10.771 27.629,16.271
3D body "IDC_1.27mm_2x3.step": height 5.5, standoff -2, extent 101.452,1.143 111.562,6.243
3D body "Coilcraft-MSD1260.STEP": height 6.2, standoff 0, extent 45.717,5.28 57.917,17.48
3D body "Coilcraft-MSD1260.STEP": height 6.2, standoff 0, extent 84.425,11.122 96.625,23.322
3D body "Coilcraft-MSD1260.STEP": height 6.2, standoff 0, extent 9.744,8.793 21.944,20.993
3D body "0805.STEP": height 0.6, standoff 0, extent 61.449,3.584 62.719,5.616
3D body "0805.STEP": height 0.6, standoff 0, extent 53.626,36.568 55.658,37.838
3D body "0805.STEP": height 0.6, standoff 0, extent 61.119,16.284 63.151,17.554
3D body "1206.STEP": height 0.6, standoff 0, extent 45.417,32.258 48.465,33.782
3D body "0805.STEP": height 0.6, standoff 0, extent 53.626,38.388 55.658,39.658
3D body "1206.STEP": height 0.6, standoff 0, extent 47.322,28.194 48.846,31.242
3D body "1206.STEP": height 0.6, standoff 0, extent 44.909,28.194 46.433,31.242
3D body "0805.STEP": height 0.6, standoff 0, extent 66.108,18.824 68.14,20.094
3D body "0805.STEP": height 0.6, standoff 0, extent 53.626,40.209 55.658,41.479
3D body "0805.STEP": height 0.6, standoff 0, extent 69.882,38.727 71.152,40.759
3D body "0805.STEP": height 0.6, standoff 0, extent 69.882,35.179 71.152,37.211
3D body "0805.STEP": height 0.6, standoff 0, extent 67.871,38.727 69.141,40.759
3D body "0805.STEP": height 0.6, standoff 0, extent 57.309,37.203 58.579,39.235
3D body "0805.STEP": height 0.6, standoff 0, extent 42.45,37.076 44.482,38.346
3D body "0805.STEP": height 0.6, standoff 0, extent 53.626,44.442 55.658,45.712
3D body "0805.STEP": height 0.6, standoff 0, extent 69.247,21.201 70.517,23.233
3D body "0805.STEP": height 0.6, standoff 0, extent 53.626,42.029 55.658,43.299
3D body "0805.STEP": height 0.6, standoff 0, extent 101.251,8.537 102.521,10.569
3D body "0805.STEP": height 0.6, standoff 0, extent 92.361,41.521 94.393,42.791
3D body "0805.STEP": height 0.6, standoff 0, extent 99.854,21.237 101.886,22.507
3D body "1206.STEP": height 0.6, standoff 0, extent 84.152,37.211 87.2,38.735
3D body "0805.STEP": height 0.6, standoff 0, extent 92.361,43.341 94.393,44.611
3D body "1206.STEP": height 0.6, standoff 0, extent 86.057,33.147 87.581,36.195
3D body "1206.STEP": height 0.6, standoff 0, extent 83.644,33.147 85.168,36.195
3D body "0805.STEP": height 0.6, standoff 0, extent 104.843,23.777 106.875,25.047
3D body "0805.STEP": height 0.6, standoff 0, extent 92.361,45.162 94.393,46.432
3D body "0805.STEP": height 0.6, standoff 0, extent 108.617,43.68 109.887,45.712
3D body "0805.STEP": height 0.6, standoff 0, extent 108.617,40.132 109.887,42.164
3D body "0805.STEP": height 0.6, standoff 0, extent 106.606,43.68 107.876,45.712
3D body "0805.STEP": height 0.6, standoff 0, extent 96.044,42.156 97.314,44.188
3D body "0805.STEP": height 0.6, standoff 0, extent 81.185,42.029 83.217,43.299
3D body "0805.STEP": height 0.6, standoff 0, extent 92.361,49.395 94.393,50.665
3D body "0805.STEP": height 0.6, standoff 0, extent 107.982,26.154 109.252,28.186
3D body "0805.STEP": height 0.6, standoff 0, extent 92.361,46.982 94.393,48.252
3D body "0805.STEP": height 0.6, standoff 0, extent 26.543,7.097 27.813,9.129
3D body "0805.STEP": height 0.6, standoff 0, extent 17.653,40.081 19.685,41.351
3D body "0805.STEP": height 0.6, standoff 0, extent 25.146,19.797 27.178,21.067
3D body "1206.STEP": height 0.6, standoff 0, extent 9.444,35.771 12.492,37.295
3D body "0805.STEP": height 0.6, standoff 0, extent 17.653,41.902 19.685,43.172
3D body "1206.STEP": height 0.6, standoff 0, extent 11.349,31.707 12.873,34.755
3D body "1206.STEP": height 0.6, standoff 0, extent 8.936,31.707 10.46,34.755
3D body "0805.STEP": height 0.6, standoff 0, extent 30.135,22.337 32.167,23.607
3D body "0805.STEP": height 0.6, standoff 0, extent 17.653,43.722 19.685,44.992
3D body "0805.STEP": height 0.6, standoff 0, extent 33.909,42.24 35.179,44.272
3D body "0805.STEP": height 0.6, standoff 0, extent 33.909,38.692 35.179,40.724
3D body "0805.STEP": height 0.6, standoff 0, extent 31.898,42.24 33.168,44.272
3D body "0805.STEP": height 0.6, standoff 0, extent 21.336,40.716 22.606,42.748
3D body "0805.STEP": height 0.6, standoff 0, extent 6.477,40.589 8.509,41.859
3D body "0805.STEP": height 0.6, standoff 0, extent 17.653,47.955 19.685,49.225
3D body "0805.STEP": height 0.6, standoff 0, extent 33.274,24.714 34.544,26.746
3D body "0805.STEP": height 0.6, standoff 0, extent 17.653,45.542 19.685,46.812
3D body "step_temp.STEP": height 1.2, standoff 0, extent 64.969,10.659 69.969,17.059
3D body "step_temp.STEP": height 1.2, standoff 0, extent 103.704,15.612 108.704,22.012
3D body "step_temp.STEP": height 1.2, standoff 0, extent 28.996,14.172 33.996,20.572
3D body "62701221621.stp": height 4.95, standoff -2.35, extent 27.558,51.181 41.528,56.231
3D body "step_temp.STEP": height 0.75, standoff 0, extent 63.716,1.781 65.316,4.981
3D body "step_temp.STEP": height 0.75, standoff 0, extent 104,7.44 105.6,10.64
3D body "step_temp.STEP": height 0.75, standoff 0, extent 28.715,4.194 30.315,7.394
3D body "User Library-SMAJ.STEP": height 2, standoff 0.01, extent 38.922,47.259 43.851,49.799
3D body "TLVH431BIDBZRG4.STEP": height 1.12, standoff 0, extent 63.731,37.309 66.101,40.229
3D body "TLVH431BIDBZRG4.STEP": height 1.12, standoff 0, extent 59.135,41.501 62.055,43.87
3D body "User Library-SMAJ.STEP": height 2, standoff 0.01, extent 77.756,38.183 80.296,43.113
3D body "TLVH431BIDBZRG4.STEP": height 1.12, standoff 0, extent 102.466,42.262 104.836,45.182
3D body "TLVH431BIDBZRG4.STEP": height 1.12, standoff 0, extent 97.928,46.319 100.848,48.688
3D body "User Library-SMAJ.STEP": height 2, standoff 0.01, extent 3.048,36.743 5.588,41.673
3D body "TLVH431BIDBZRG4.STEP": height 1.12, standoff 0, extent 27.758,40.822 30.127,43.742
3D body "TLVH431BIDBZRG4.STEP": height 1.12, standoff 0, extent 23.22,44.879 26.14,47.249
3D body "CircuitWorks-TO-252.STEP": height 2.3, standoff 0, extent 39.366,39.746 49.066,46.326
3D body "TLVH431BIDBZRG4.STEP": height 1.12, standoff 0, extent 45.393,35.243 48.313,37.612
3D body "CircuitWorks-TO-252.STEP": height 2.3, standoff 0, extent 78.101,44.699 87.801,51.279
3D body "TLVH431BIDBZRG4.STEP": height 1.12, standoff 0, extent 84.128,40.196 87.048,42.565
3D body "CircuitWorks-TO-252.STEP": height 2.3, standoff 0, extent 3.393,43.259 13.093,49.839
3D body "TLVH431BIDBZRG4.STEP": height 1.12, standoff 0, extent 9.42,38.756 12.34,41.126
3D body "TLP181(GB-TPL,F,T)--3DModel-STEP-510211.STEP": height 2.8, standoff 0, extent 65.39,25.761 68.99,32.761
3D body "TLP181(GB-TPL,F,T)--3DModel-STEP-510211.STEP": height 2.8, standoff 0, extent 104.125,30.714 107.725,37.714
3D body "TLP181(GB-TPL,F,T)--3DModel-STEP-510211.STEP": height 2.8, standoff 0, extent 29.417,29.274 33.017,36.274
3D body "CRAFTECH-MHN2038-19-108.STEP": height 2.11, standoff -4.89, extent 70.744,25.47 76.244,30.947
3D body "CRAFTECH-MHN2038-19-108.STEP": height 2.11, standoff -4.89, extent 1.923,-0.703 7.423,4.773
3D body "CRAFTECH-MHN2038-19-108.STEP": height 2.11, standoff -4.89, extent 1.923,50.376 7.423,55.853

## PDIP-14 [mm]
pads (14):
  rect 1.5x1.5 hole 0.9: 1(0,0)
  round 1.5 hole 0.9: 2(0,-2.54) 3(0,-5.08) 4(0,-7.62) 5(0,-10.16) 6(0,-12.7) 7(0,-15.24) 8(7.62,-15.24) 9(7.62,-12.7) 10(7.62,-10.16) 11(7.62,-7.62) 12(7.62,-5.08) 13(7.62,-2.54) 14(7.62,0)
Top Overlay:
  lines w0.2: 1.16,-17.47 1.16,2.23 3.175,2.23 ccw(c3.81,2.23) 4.445,2.23 6.46,2.23 6.46,-17.47 1.16,-17.47
3D body "DIP-14P-M02.stp": height 4.36, standoff -3, extent -0.125,-17.42 7.745,2.18

## piezobuzzer [mm]
pads (2):
  round 1.28 hole 0.85: 1(0,0) 2(5,0)
Top Overlay:
  circle w0.127: c2.5,0 r6.1
Mechanical 13:
  circle w0.127: c2.5,0 r6.1
Mechanical 15:
  circle w0.05: c2.5,0 r6.35
3D body "PS1240P02BT--3DModel-STEP-56544.STEP": height 6.61, standoff -14.39, extent -3.6,-5.969 8.6,6.231

## piezobuzzer(9x5mm) [mm]
pads (2):
  round 1.308 hole 0.8: 1(0,0) 2(5,0)
Top Overlay:
  circle w0.127: c2.425,0.05 r4.5
Mechanical 13:
  circle w0.127: c2.425,0.05 r4.5
Mechanical 15:
  circle w0.05: c2.425,0.05 r4.75
3D body "User Library-BZEG-0905.STEP": height 5, standoff -5.5, extent -2.225,-4.775 7.275,4.725

## PiezoBuzzer(SMD-8030B) [mm]
pads (4):
  rect 1x1.5 smd: 1(0,0) 2(0,7.7) ""(6,0) ""(6,7.7)
Top Overlay:
  lines w0.254: -1,0 7,0 7,7.7 -1,7.7 -1,0
3D body: height 3, standoff 0, extent -1,0 7,7.7

## PJ-324M [mm]
pads (5):
  oval 1.308x2.616 hole 0.8 square: 1(0,0) 4(11.3,-4.1)
  oval 2.016x1.008 hole 0.5 square: 2(7.9,5.2) 5(4.2,-4.6)
  oval 2.616x1.308 hole 0.8 square: 3(6.9,2.6)
Top Overlay:
  circle w0.2: c-0.5,-6.25 r0.1
  lines w0.127: 2.572,-5.5 -1.7,-5.5 -1.7,-3 ; 5.828,-5.5 10.326,-5.5 ; 6.272,6 -1.7,6 -1.7,3 ; 9.528,6 12.5,6 12.5,-5.5 12.274,-5.5 ; -1.7,-3 -1.7,3 ; -1.7,-3 -5.2,-3 -5.2,3 -1.7,3
Mechanical 13:
  circle w0.2: c-0.5,-6.25 r0.1
  lines w0.127: -1.7,-3 -1.7,-5.5 12.5,-5.5 12.5,6 -1.7,6 -1.7,3 ; -1.7,-3 -1.7,3 ; -1.7,-3 -5.2,-3 -5.2,3 -1.7,3
Mechanical 15:
  lines w0.05: -5.45,-5.75 12.75,-5.75 12.75,6.25 -5.45,6.25 -5.45,-5.75
3D body "step_temp.STEP": height 6.3, standoff -2.5, extent -5.2,-5.75 12.5,5.75

## PJ-327A [mm]
pads (6):
  rect 1.2x2.5 smd: 1(9.7,-3.25) 2(8.6,3.25) 3(4.6,3.25) 4(1.6,3.25)
  round 1 hole 1 unplated: ""(0,0) ""(7,0)
Top Overlay:
  circle w0.2: c9.7,-5.5 r0.1
  lines w0.127: 0.68,3.05 -3.6,3.05 -3.6,-3.05 8.78,-3.05 ; 9.52,3.05 10.5,3.05 10.5,-1.68
Mechanical 13:
  circle w0.2: c9.7,-5.5 r0.1
  lines w0.127: -1.6,-3.05 -1.6,3.05 ; -1.6,-3.05 -3.6,-3.05 -3.6,3.05 -1.6,3.05 ; -1.6,-3.05 -1.06,-3.05 10.5,-3.05 10.5,3.05 -1.06,3.05 -1.6,3.05
Mechanical 15:
  lines w0.05: -3.85,-4.75 10.75,-4.75 10.75,4.75 -3.85,4.75 -3.85,-4.75
3D body "step_temp.STEP": height 5.3, standoff -0.7, extent -3.6,-4 10.5,4

## PJ-3062-HD-R [mm]
pads (5):
  round 2 hole 1.2: 1(0,0) 2(5,5) 3(5,2.5) 4(5,-2.5) 5(5,-5)
Top Overlay:
  lines w0.254: -2.5,-3 -6,-3 -6,3 -2.5,3 ; 4.284,-6 -2.5,-6 -2.5,6 4.284,6 ; 5.716,-6 9.271,-6 9.271,6 5.716,6
Keep-Out Layer:
  board cut-out: 5.75,0 5.75,-0.099 5.699,-0.289 5.6,-0.461 5.461,-0.6 5.29,-0.699 5.099,-0.75 4.901,-0.75 4.711,-0.699 4.54,-0.6 4.4,-0.461 4.301,-0.289 4.25,-0.099 4.25,0 4.25,0.099 4.301,0.289 4.4,0.461 4.54,0.6 4.711,0.699 4.901,0.75 5.099,0.75 5.29,0.699 5.461,0.6 5.6,0.461 5.699,0.289 5.75,0.099
  board cut-out: 0.75,5 0.75,4.901 0.699,4.71 0.6,4.539 0.461,4.4 0.29,4.301 0.099,4.25 -0.099,4.25 -0.289,4.301 -0.46,4.4 -0.6,4.539 -0.699,4.71 -0.75,4.901 -0.75,5 -0.75,5.099 -0.699,5.289 -0.6,5.461 -0.46,5.6 -0.289,5.699 -0.099,5.75 0.099,5.75 0.29,5.699 0.461,5.6 0.6,5.461 0.699,5.289 0.75,5.099
  board cut-out: 0.75,-5 0.75,-5.099 0.699,-5.289 0.6,-5.461 0.461,-5.6 0.29,-5.699 0.099,-5.75 -0.099,-5.75 -0.289,-5.699 -0.46,-5.6 -0.6,-5.461 -0.699,-5.289 -0.75,-5.099 -0.75,-5 -0.75,-4.901 -0.699,-4.71 -0.6,-4.539 -0.46,-4.4 -0.289,-4.301 -0.099,-4.25 0.099,-4.25 0.29,-4.301 0.461,-4.4 0.6,-4.539 0.699,-4.71 0.75,-4.901
Keep-Out Layer:
  circle w0.025: c5,0 r0.75
  circle w0.025: c0,5 r0.75
  circle w0.025: c0,-5 r0.75
  region: 5.75,0 5.75,-0.099 5.699,-0.289 5.6,-0.461 5.461,-0.6 5.29,-0.699 5.099,-0.75 4.901,-0.75 4.711,-0.699 4.54,-0.6 4.4,-0.461 4.301,-0.289 4.25,-0.099 4.25,0 4.25,0.099 4.301,0.289 4.4,0.461 4.54,0.6 4.711,0.699 4.901,0.75 5.099,0.75 5.29,0.699 5.461,0.6 5.6,0.461 5.699,0.289 5.75,0.099
  region: 0.75,5 0.75,4.901 0.699,4.71 0.6,4.539 0.461,4.4 0.29,4.301 0.099,4.25 -0.099,4.25 -0.289,4.301 -0.46,4.4 -0.6,4.539 -0.699,4.71 -0.75,4.901 -0.75,5 -0.75,5.099 -0.699,5.289 -0.6,5.461 -0.46,5.6 -0.289,5.699 -0.099,5.75 0.099,5.75 0.29,5.699 0.461,5.6 0.6,5.461 0.699,5.289 0.75,5.099
  region: 0.75,-5 0.75,-5.099 0.699,-5.289 0.6,-5.461 0.461,-5.6 0.29,-5.699 0.099,-5.75 -0.099,-5.75 -0.289,-5.699 -0.46,-5.6 -0.6,-5.461 -0.699,-5.289 -0.75,-5.099 -0.75,-5 -0.75,-4.901 -0.699,-4.71 -0.6,-4.539 -0.46,-4.4 -0.289,-4.301 -0.099,-4.25 0.099,-4.25 0.29,-4.301 0.461,-4.4 0.6,-4.539 0.699,-4.71 0.75,-4.901
Mechanical 1:
  circle w0.025: c5,0 r0.75
  circle w0.025: c0,5 r0.75
  circle w0.025: c0,-5 r0.75
Mechanical 6:
  circle w0.7: c5,0 r0.35
  circle w0.7: c0,-5 r0.35
  circle w0.7: c0,5 r0.35
  region: -2.54,3.048 -2.54,2.921 -5.969,2.921 -5.969,-2.921 -2.413,-2.921 -2.413,-3.048 -6.096,-3.048 -6.096,3.048
Mechanical 15:
  region: -5.94,6 -5.94,5.975 -5.975,5.94 -6.025,5.94 -6.06,5.975 -6.06,6 -6.06,6.025 -6.025,6.06 -5.975,6.06 -5.94,6.025
  region: 5.45,2.35 4.55,2.35 4.55,2.65 5.45,2.65
  region: 5.45,-2.65 4.55,-2.65 4.55,-2.35 5.45,-2.35
  region: 5.45,4.85 4.55,4.85 4.55,5.15 5.45,5.15
  region: 5.45,-5.15 4.55,-5.15 4.55,-4.85 5.45,-4.85
  region: -0.15,-0.45 -0.15,0.45 0.15,0.45 0.15,-0.45
  lines w0.051: -6,-3 -6,3 -2.5,3 -2.5,6 9.2,6 9.2,-6 -2.5,-6 -2.5,-3 -6,-3
3D body "pj-3062-hd-r.stp": height 9.1, standoff -4.5, extent -5.949,-6.026 9.251,5.974

## POT [mm]
pads (3):
  oval 2.4x3 hole 1.5: 1(0,0) 2(0,-10) 3(0,-5)
Top Overlay:
  lines w0.2: 2.54,0.08 5.08,0.08 ; 3.175,-10.08 3.81,0.08 ; 3.175,0.08 2.54,-10.08 5.08,-10.08 5.08,0.08 ; 3.81,-10.08 4.445,0.08 ; 4.445,-10.08 5.08,0.08 ; 5.08,-7.54 19.781,-7.54 19.781,-2.46 5.08,-2.46 ; -2.54,-12.62 2.54,-12.62 2.54,2.62 -2.54,2.62 -2.54,-12.62
3D body "SW3dPS-Pot.STEP": height 20.64, standoff -4, extent -4.998,-12.801 20.56,2.947
3D body "volome cover2.STEP": height 24.54, standoff 2.14, extent 7.8,-15.932 27.8,5.761